# Altium footprint library WR-PHD_Socket Header_2.54mm.PcbLib: 187 footprints (part 8 of 12)
Each footprint in its own frame and in the unit in brackets; x right, y up, seen from the top. Pads: shape width x height; smd on the part's side, far side on the other; paste and mask are expansions set on the pad; w line width, h text height; cw(c..) or ccw(c..) is an arc to the next point about the centre after c.
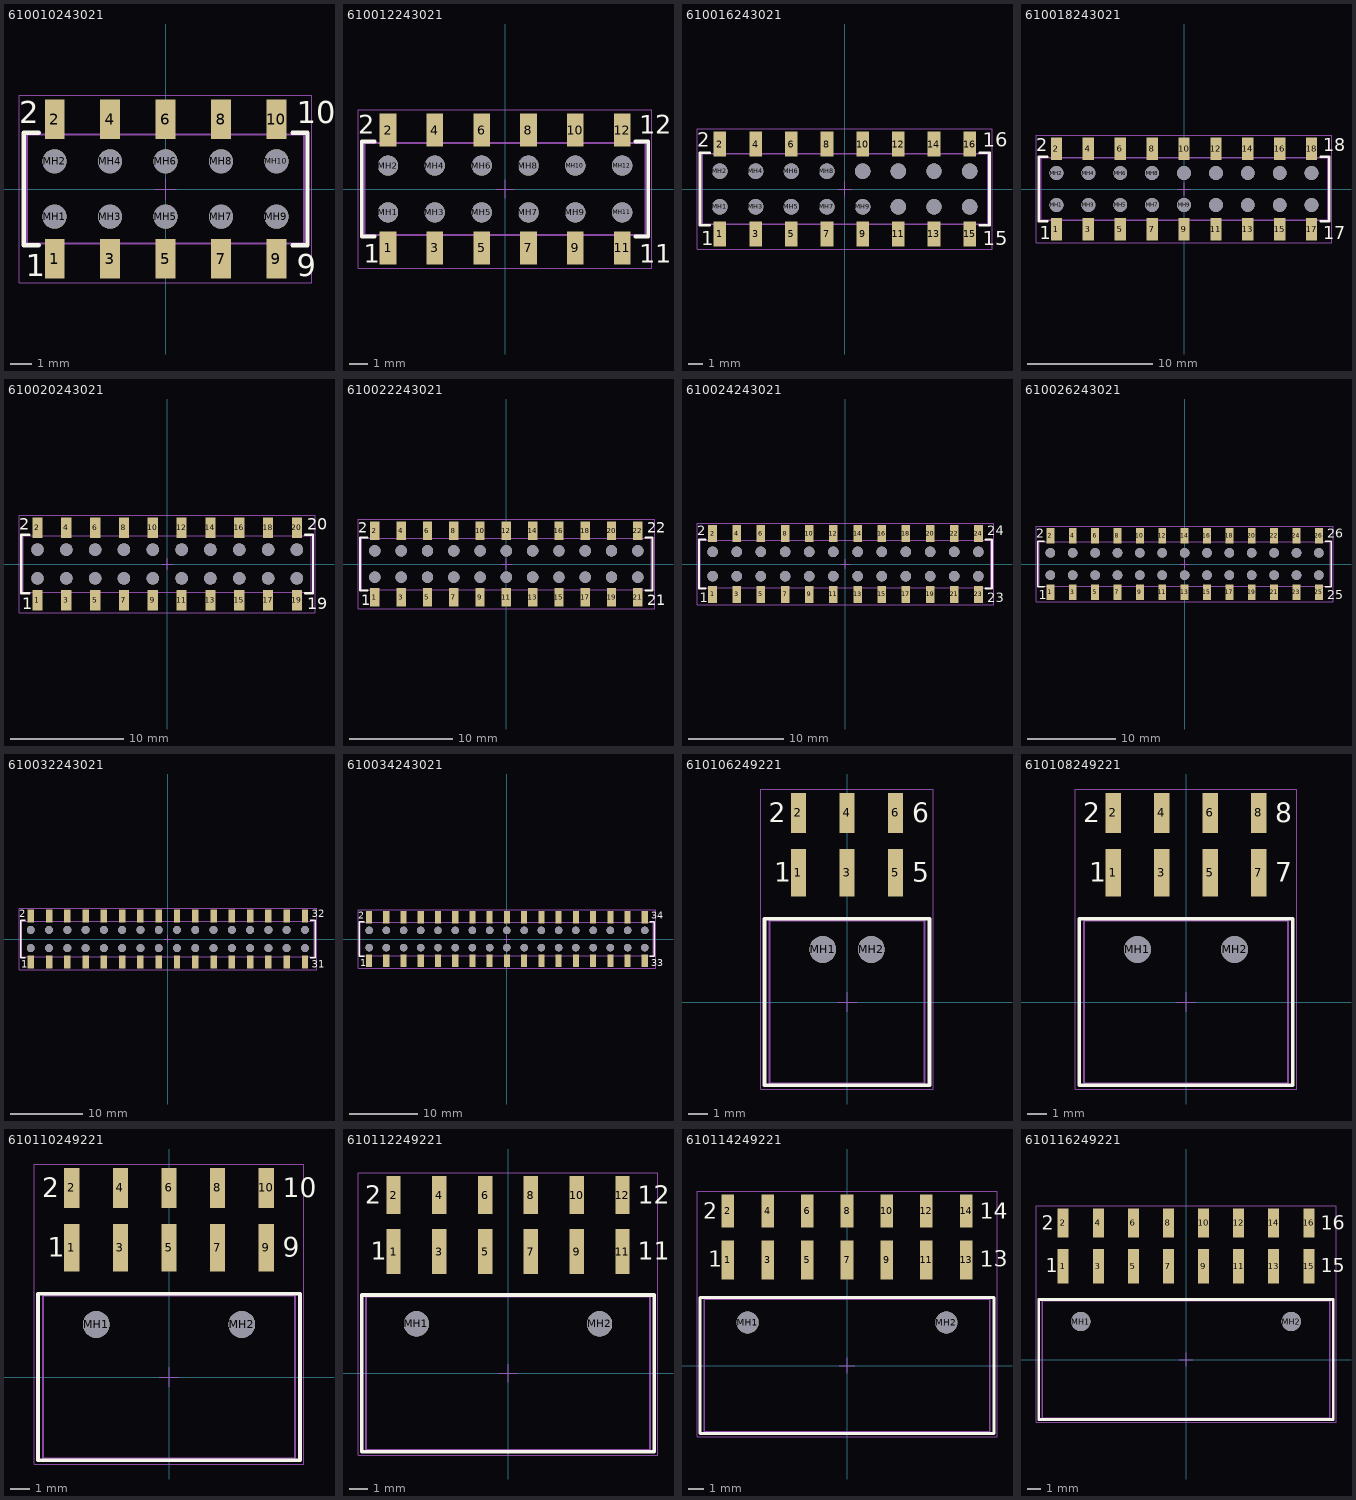
[diagram p7: the footprints below, top view; thin cyan lines are the x and y axes]

## 610010243021 [mm] "Socket Header, Pitch 2.54 mm, SMT, Vertical, dual row, 10p"
height 3.7
pads (20):
  rect 0.9x1.8 smd: 1(-5.08,-3.2) 2(-5.08,3.2) 3(-2.54,-3.2) 4(-2.54,3.2) 5(0,-3.2) 6(0,3.2) 7(2.54,-3.2) 8(2.54,3.2) 9(5.08,-3.2) 10(5.08,3.2)
  round 1.1 hole 1.1 unplated: MH1(-5.08,-1.27) MH2(-5.08,1.27) MH3(-2.54,-1.27) MH4(-2.54,1.27) MH5(0,-1.27) MH6(0,1.27) MH7(2.54,-1.27) MH8(2.54,1.27) MH9(5.08,-1.27) MH10(5.08,1.27)
Top Overlay:
  lines w0.2: -5.81,-2.575 -6.5,-2.575 -6.5,2.575 -5.81,2.575 ; 5.81,-2.575 6.5,-2.575 6.5,2.575 5.81,2.575
  text "1" at -6.41,-4 h1.02
  text "2" at -6.71,3 h1.02
  text "10" at 6.01,3 h1.02
  text "9" at 6.01,-4 h1.02
Mechanical 13:
  lines w0.1: -5.33,-2.5 -5.33,-3.6 -4.83,-3.6 -4.83,-2.5 ; -5.33,2.5 -5.33,3.6 -4.83,3.6 -4.83,2.5 ; -2.79,-2.5 -2.79,-3.6 -2.29,-3.6 -2.29,-2.5 ; -2.79,2.5 -2.79,3.6 -2.29,3.6 -2.29,2.5 ; -0.25,-2.5 -0.25,-3.6 0.25,-3.6 0.25,-2.5 ; -0.25,2.5 -0.25,3.6 0.25,3.6 0.25,2.5 ; 2.29,-2.5 2.29,-3.6 2.79,-3.6 2.79,-2.5 ; 2.29,2.5 2.29,3.6 2.79,3.6 2.79,2.5 ; 4.83,-2.5 4.83,-3.6 5.33,-3.6 5.33,-2.5 ; 4.83,2.5 4.83,3.6 5.33,3.6 5.33,2.5 ; -6.35,-2.5 6.35,-2.5 6.35,2.5 -6.35,2.5 -6.35,-2.5
Mechanical 15:
  lines w0.05: -0.5,0 0.5,0 ; 0,-0.5 0,0.5 ; -6.7,-4.3 6.7,-4.3 6.7,4.3 -6.7,4.3 -6.7,-4.3
3D body "610010243021.stp": height 3.7, standoff 0, extent -6.35,-3.603 6.35,3.603

## 610012243021 [mm] "Socket Header, Pitch 2.54 mm, SMT, Vertical, dual row, 12p"
height 3.7
pads (24):
  rect 0.9x1.8 smd: 1(-6.35,-3.2) 2(-6.35,3.2) 3(-3.81,-3.2) 4(-3.81,3.2) 5(-1.27,-3.2) 6(-1.27,3.2) 7(1.27,-3.2) 8(1.27,3.2) 9(3.81,-3.2) 10(3.81,3.2) 11(6.35,-3.2) 12(6.35,3.2)
  round 1.1 hole 1.1 unplated: MH1(-6.35,-1.27) MH2(-6.35,1.27) MH3(-3.81,-1.27) MH4(-3.81,1.27) MH5(-1.27,-1.27) MH6(-1.27,1.27) MH7(1.27,-1.27) MH8(1.27,1.27) MH9(3.81,-1.27) MH10(3.81,1.27) MH11(6.35,-1.27) MH12(6.35,1.27)
Top Overlay:
  lines w0.2: -7.08,-2.575 -7.77,-2.575 -7.77,2.575 -7.08,2.575 ; 7.08,-2.575 7.77,-2.575 7.77,2.575 7.08,2.575
  text "2" at -7.98,3 h1.02
  text "1" at -7.68,-4 h1.02
  text "12" at 7.28,3 h1.02
  text "11" at 7.28,-4 h1.02
Mechanical 13:
  lines w0.1: -6.6,-2.5 -6.6,-3.6 -6.1,-3.6 -6.1,-2.5 ; -6.6,2.5 -6.6,3.6 -6.1,3.6 -6.1,2.5 ; -4.06,-2.5 -4.06,-3.6 -3.56,-3.6 -3.56,-2.5 ; -4.06,2.5 -4.06,3.6 -3.56,3.6 -3.56,2.5 ; -1.52,-2.5 -1.52,-3.6 -1.02,-3.6 -1.02,-2.5 ; -1.52,2.5 -1.52,3.6 -1.02,3.6 -1.02,2.5 ; 1.02,-2.5 1.02,-3.6 1.52,-3.6 1.52,-2.5 ; 1.02,2.5 1.02,3.6 1.52,3.6 1.52,2.5 ; 3.56,-2.5 3.56,-3.6 4.06,-3.6 4.06,-2.5 ; 3.56,2.5 3.56,3.6 4.06,3.6 4.06,2.5 ; 6.1,-2.5 6.1,-3.6 6.6,-3.6 6.6,-2.5 ; 6.1,2.5 6.1,3.6 6.6,3.6 6.6,2.5 ; -7.62,-2.5 -7.62,2.5 7.62,2.5 7.62,-2.5 -7.62,-2.5
Mechanical 15:
  lines w0.05: -0.5,0 0.5,0 ; 0,-0.5 0,0.5 ; -7.97,-4.3 -7.97,4.3 7.97,4.3 7.97,-4.3 -7.97,-4.3
3D body "610012243021.stp": height 3.7, standoff 0, extent -7.62,-3.603 7.62,3.603

## 610016243021 [mm] "Socket Header, Pitch 2.54 mm, SMT, Vertical, dual row, 16p"
height 3.7
pads (32):
  rect 0.9x1.8 smd: 1(-8.89,-3.2) 2(-8.89,3.2) 3(-6.35,-3.2) 4(-6.35,3.2) 5(-3.81,-3.2) 6(-3.81,3.2) 7(-1.27,-3.2) 8(-1.27,3.2) 9(1.27,-3.2) 10(1.27,3.2) 11(3.81,-3.2) 12(3.81,3.2) 13(6.35,-3.2) 14(6.35,3.2) 15(8.89,-3.2) 16(8.89,3.2)
  round 1.1 hole 1.1 unplated: MH1(-8.89,-1.27) MH2(-8.89,1.27) MH3(-6.35,-1.27) MH4(-6.35,1.27) MH5(-3.81,-1.27) MH6(-3.81,1.27) MH7(-1.27,-1.27) MH8(-1.27,1.27) MH9(1.27,-1.27) MH10(1.27,1.27) MH11(3.81,-1.27) MH12(3.81,1.27) MH13(6.35,-1.27) MH14(6.35,1.27) MH15(8.89,-1.27) MH16(8.89,1.27)
Top Overlay:
  lines w0.2: -9.62,-2.575 -10.31,-2.575 -10.31,2.575 -9.62,2.575 ; 9.62,-2.575 10.31,-2.575 10.31,2.575 9.62,2.575
  text "1" at -10.22,-4 h1.02
  text "2" at -10.52,3 h1.02
  text "16" at 9.82,3 h1.02
  text "15" at 9.82,-4 h1.02
Mechanical 13:
  lines w0.1: -9.14,-2.5 -9.14,-3.6 -8.64,-3.6 -8.64,-2.5 ; -9.14,2.5 -9.14,3.6 -8.64,3.6 -8.64,2.5 ; -6.6,-2.5 -6.6,-3.6 -6.1,-3.6 -6.1,-2.5 ; -6.6,2.5 -6.6,3.6 -6.1,3.6 -6.1,2.5 ; -4.06,-2.5 -4.06,-3.6 -3.56,-3.6 -3.56,-2.5 ; -4.06,2.5 -4.06,3.6 -3.56,3.6 -3.56,2.5 ; -1.52,-2.5 -1.52,-3.6 -1.02,-3.6 -1.02,-2.5 ; -1.52,2.5 -1.52,3.6 -1.02,3.6 -1.02,2.5 ; 1.02,-2.5 1.02,-3.6 1.52,-3.6 1.52,-2.5 ; 1.02,2.5 1.02,3.6 1.52,3.6 1.52,2.5 ; 3.56,-2.5 3.56,-3.6 4.06,-3.6 4.06,-2.5 ; 3.56,2.5 3.56,3.6 4.06,3.6 4.06,2.5 ; 6.1,-2.5 6.1,-3.6 6.6,-3.6 6.6,-2.5 ; 6.1,2.5 6.1,3.6 6.6,3.6 6.6,2.5 ; 8.64,-2.5 8.64,-3.6 9.14,-3.6 9.14,-2.5 ; 8.64,2.5 8.64,3.6 9.14,3.6 9.14,2.5 ; -10.16,-2.5 10.16,-2.5 10.16,2.5 -10.16,2.5 -10.16,-2.5
Mechanical 15:
  lines w0.05: -0.5,0 0.5,0 ; 0,-0.5 0,0.5 ; -10.51,-4.3 10.51,-4.3 10.51,4.3 -10.51,4.3 -10.51,-4.3
3D body "610016243021.stp": height 3.7, standoff 0, extent -10.16,-3.603 10.16,3.603

## 610018243021 [mm] "Socket Header, Pitch 2.54 mm, SMT, Vertical, dual row, 18p"
height 3.7
pads (36):
  rect 0.9x1.8 smd: 1(-10.16,-3.2) 2(-10.16,3.2) 3(-7.62,-3.2) 4(-7.62,3.2) 5(-5.08,-3.2) 6(-5.08,3.2) 7(-2.54,-3.2) 8(-2.54,3.2) 9(0,-3.2) 10(0,3.2) 11(2.54,-3.2) 12(2.54,3.2) 13(5.08,-3.2) 14(5.08,3.2) 15(7.62,-3.2) 16(7.62,3.2) 17(10.16,-3.2) 18(10.16,3.2)
  round 1.1 hole 1.1 unplated: MH1(-10.16,-1.27) MH2(-10.16,1.27) MH3(-7.62,-1.27) MH4(-7.62,1.27) MH5(-5.08,-1.27) MH6(-5.08,1.27) MH7(-2.54,-1.27) MH8(-2.54,1.27) MH9(0,-1.27) MH10(0,1.27) MH11(2.54,-1.27) MH12(2.54,1.27) MH13(5.08,-1.27) MH14(5.08,1.27) MH15(7.62,-1.27) MH16(7.62,1.27) MH17(10.16,-1.27) MH18(10.16,1.27)
Top Overlay:
  lines w0.2: -10.89,-2.575 -11.58,-2.575 -11.58,2.575 -10.89,2.575 ; 10.89,-2.575 11.58,-2.575 11.58,2.575 10.89,2.575
  text "2" at -11.79,3 h1.02
  text "1" at -11.49,-4 h1.02
  text "18" at 11.09,3 h1.02
  text "17" at 11.09,-4 h1.02
Mechanical 13:
  lines w0.1: -10.41,-2.5 -10.41,-3.6 -9.91,-3.6 -9.91,-2.5 ; -10.41,2.5 -10.41,3.6 -9.91,3.6 -9.91,2.5 ; -7.87,-2.5 -7.87,-3.6 -7.37,-3.6 -7.37,-2.5 ; -7.87,2.5 -7.87,3.6 -7.37,3.6 -7.37,2.5 ; -5.33,-2.5 -5.33,-3.6 -4.83,-3.6 -4.83,-2.5 ; -5.33,2.5 -5.33,3.6 -4.83,3.6 -4.83,2.5 ; -2.79,-2.5 -2.79,-3.6 -2.29,-3.6 -2.29,-2.5 ; -2.79,2.5 -2.79,3.6 -2.29,3.6 -2.29,2.5 ; -0.25,-2.5 -0.25,-3.6 0.25,-3.6 0.25,-2.5 ; -0.25,2.5 -0.25,3.6 0.25,3.6 0.25,2.5 ; 2.29,-2.5 2.29,-3.6 2.79,-3.6 2.79,-2.5 ; 2.29,2.5 2.29,3.6 2.79,3.6 2.79,2.5 ; 4.83,-2.5 4.83,-3.6 5.33,-3.6 5.33,-2.5 ; 4.83,2.5 4.83,3.6 5.33,3.6 5.33,2.5 ; 7.37,-2.5 7.37,-3.6 7.87,-3.6 7.87,-2.5 ; 7.37,2.5 7.37,3.6 7.87,3.6 7.87,2.5 ; 9.91,-2.5 9.91,-3.6 10.41,-3.6 10.41,-2.5 ; 9.91,2.5 9.91,3.6 10.41,3.6 10.41,2.5 ; -11.43,-2.5 -11.43,2.5 11.43,2.5 11.43,-2.5 -11.43,-2.5
Mechanical 15:
  lines w0.05: -0.5,0 0.5,0 ; 0,-0.5 0,0.5 ; -11.78,-4.3 -11.78,4.3 11.78,4.3 11.78,-4.3 -11.78,-4.3
3D body "610018243021.stp": height 3.7, standoff 0, extent -11.43,-3.603 11.43,3.603

## 610020243021 [mm] "Socket Header, Pitch 2.54 mm, SMT, Vertical, dual row, 20p"
height 3.7
pads (40):
  rect 0.9x1.8 smd: 1(-11.43,-3.2) 2(-11.43,3.2) 3(-8.89,-3.2) 4(-8.89,3.2) 5(-6.35,-3.2) 6(-6.35,3.2) 7(-3.81,-3.2) 8(-3.81,3.2) 9(-1.27,-3.2) 10(-1.27,3.2) 11(1.27,-3.2) 12(1.27,3.2) 13(3.81,-3.2) 14(3.81,3.2) 15(6.35,-3.2) 16(6.35,3.2) 17(8.89,-3.2) 18(8.89,3.2) 19(11.43,-3.2) 20(11.43,3.2)
  round 1.1 hole 1.1 unplated: MH1(-11.43,-1.27) MH2(-11.43,1.27) MH3(-8.89,-1.27) MH4(-8.89,1.27) MH5(-6.35,-1.27) MH6(-6.35,1.27) MH7(-3.81,-1.27) MH8(-3.81,1.27) MH9(-1.27,-1.27) MH10(-1.27,1.27) MH11(1.27,-1.27) MH12(1.27,1.27) MH13(3.81,-1.27) MH14(3.81,1.27) MH15(6.35,-1.27) MH16(6.35,1.27) MH17(8.89,-1.27) MH18(8.89,1.27) MH19(11.43,-1.27) MH20(11.43,1.27)
Top Overlay:
  lines w0.2: -12.16,-2.575 -12.85,-2.575 -12.85,2.575 -12.16,2.575 ; 12.16,-2.575 12.85,-2.575 12.85,2.575 12.16,2.575
  text "19" at 12.36,-4 h1.02
  text "20" at 12.36,3 h1.02
  text "2" at -13.06,3 h1.02
  text "1" at -12.76,-4 h1.02
Mechanical 13:
  lines w0.1: -11.68,-2.5 -11.68,-3.6 -11.18,-3.6 -11.18,-2.5 ; -11.68,2.5 -11.68,3.6 -11.18,3.6 -11.18,2.5 ; -9.14,-2.5 -9.14,-3.6 -8.64,-3.6 -8.64,-2.5 ; -9.14,2.5 -9.14,3.6 -8.64,3.6 -8.64,2.5 ; -6.6,-2.5 -6.6,-3.6 -6.1,-3.6 -6.1,-2.5 ; -6.6,2.5 -6.6,3.6 -6.1,3.6 -6.1,2.5 ; -4.06,-2.5 -4.06,-3.6 -3.56,-3.6 -3.56,-2.5 ; -4.06,2.5 -4.06,3.6 -3.56,3.6 -3.56,2.5 ; -1.52,-2.5 -1.52,-3.6 -1.02,-3.6 -1.02,-2.5 ; -1.52,2.5 -1.52,3.6 -1.02,3.6 -1.02,2.5 ; 1.02,-2.5 1.02,-3.6 1.52,-3.6 1.52,-2.5 ; 1.02,2.5 1.02,3.6 1.52,3.6 1.52,2.5 ; 3.56,-2.5 3.56,-3.6 4.06,-3.6 4.06,-2.5 ; 3.56,2.5 3.56,3.6 4.06,3.6 4.06,2.5 ; 6.1,-2.5 6.1,-3.6 6.6,-3.6 6.6,-2.5 ; 6.1,2.5 6.1,3.6 6.6,3.6 6.6,2.5 ; 8.64,-2.5 8.64,-3.6 9.14,-3.6 9.14,-2.5 ; 8.64,2.5 8.64,3.6 9.14,3.6 9.14,2.5 ; 11.18,-2.5 11.18,-3.6 11.68,-3.6 11.68,-2.5 ; 11.18,2.5 11.18,3.6 11.68,3.6 11.68,2.5 ; -12.7,-2.5 -12.7,2.5 12.7,2.5 12.7,-2.5 -12.7,-2.5
Mechanical 15:
  lines w0.05: -0.5,0 0.5,0 ; 0,-0.5 0,0.5 ; -13.05,-4.3 -13.05,4.3 13.05,4.3 13.05,-4.3 -13.05,-4.3
3D body "610020243021.stp": height 3.7, standoff 0, extent -12.7,-3.603 12.7,3.603

## 610022243021 [mm] "Socket Header, Pitch 2.54 mm, SMT, Vertical, dual row, 22p"
height 3.7
pads (44):
  rect 0.9x1.8 smd: 1(-12.7,-3.2) 2(-12.7,3.2) 3(-10.16,-3.2) 4(-10.16,3.2) 5(-7.62,-3.2) 6(-7.62,3.2) 7(-5.08,-3.2) 8(-5.08,3.2) 9(-2.54,-3.2) 10(-2.54,3.2) 11(0,-3.2) 12(0,3.2) 13(2.54,-3.2) 14(2.54,3.2) 15(5.08,-3.2) 16(5.08,3.2) 17(7.62,-3.2) 18(7.62,3.2) 19(10.16,-3.2) 20(10.16,3.2) 21(12.7,-3.2) 22(12.7,3.2)
  round 1.1 hole 1.1 unplated: MH1(-12.7,-1.27) MH2(-12.7,1.27) MH3(-10.16,-1.27) MH4(-10.16,1.27) MH5(-7.62,-1.27) MH6(-7.62,1.27) MH7(-5.08,-1.27) MH8(-5.08,1.27) MH9(-2.54,-1.27) MH10(-2.54,1.27) MH11(0,-1.27) MH12(0,1.27) MH13(2.54,-1.27) MH14(2.54,1.27) MH15(5.08,-1.27) MH16(5.08,1.27) MH17(7.62,-1.27) MH18(7.62,1.27) MH19(10.16,-1.27) MH20(10.16,1.27) MH21(12.7,-1.27) MH22(12.7,1.27)
Top Overlay:
  lines w0.2: -13.43,-2.575 -14.12,-2.575 -14.12,2.575 -13.43,2.575 ; 13.43,-2.575 14.12,-2.575 14.12,2.575 13.43,2.575
  text "21" at 13.63,-4 h1.02
  text "22" at 13.63,3 h1.02
  text "1" at -14.03,-4 h1.02
  text "2" at -14.33,3 h1.02
Mechanical 13:
  lines w0.1: -12.95,-2.5 -12.95,-3.6 -12.45,-3.6 -12.45,-2.5 ; -12.95,2.5 -12.95,3.6 -12.45,3.6 -12.45,2.5 ; -10.41,-2.5 -10.41,-3.6 -9.91,-3.6 -9.91,-2.5 ; -10.41,2.5 -10.41,3.6 -9.91,3.6 -9.91,2.5 ; -7.87,-2.5 -7.87,-3.6 -7.37,-3.6 -7.37,-2.5 ; -7.87,2.5 -7.87,3.6 -7.37,3.6 -7.37,2.5 ; -5.33,-2.5 -5.33,-3.6 -4.83,-3.6 -4.83,-2.5 ; -5.33,2.5 -5.33,3.6 -4.83,3.6 -4.83,2.5 ; -2.79,-2.5 -2.79,-3.6 -2.29,-3.6 -2.29,-2.5 ; -2.79,2.5 -2.79,3.6 -2.29,3.6 -2.29,2.5 ; -0.25,-2.5 -0.25,-3.6 0.25,-3.6 0.25,-2.5 ; -0.25,2.5 -0.25,3.6 0.25,3.6 0.25,2.5 ; 2.29,-2.5 2.29,-3.6 2.79,-3.6 2.79,-2.5 ; 2.29,2.5 2.29,3.6 2.79,3.6 2.79,2.5 ; 4.83,-2.5 4.83,-3.6 5.33,-3.6 5.33,-2.5 ; 4.83,2.5 4.83,3.6 5.33,3.6 5.33,2.5 ; 7.37,-2.5 7.37,-3.6 7.87,-3.6 7.87,-2.5 ; 7.37,2.5 7.37,3.6 7.87,3.6 7.87,2.5 ; 9.91,-2.5 9.91,-3.6 10.41,-3.6 10.41,-2.5 ; 9.91,2.5 9.91,3.6 10.41,3.6 10.41,2.5 ; 12.45,-2.5 12.45,-3.6 12.95,-3.6 12.95,-2.5 ; 12.45,2.5 12.45,3.6 12.95,3.6 12.95,2.5 ; -13.97,-2.5 13.97,-2.5 13.97,2.5 -13.97,2.5 -13.97,-2.5
Mechanical 15:
  lines w0.05: -0.5,0 0.5,0 ; 0,-0.5 0,0.5 ; -14.32,-4.3 14.32,-4.3 14.32,4.3 -14.32,4.3 -14.32,-4.3
3D body "610022243021.stp": height 3.7, standoff 0, extent -13.97,-3.603 13.97,3.603

## 610024243021 [mm] "Socket Header, Pitch 2.54 mm, SMT, Vertical, dual row, 24p"
height 3.7
pads (48):
  rect 0.9x1.8 smd: 1(-13.97,-3.2) 2(-13.97,3.2) 3(-11.43,-3.2) 4(-11.43,3.2) 5(-8.89,-3.2) 6(-8.89,3.2) 7(-6.35,-3.2) 8(-6.35,3.2) 9(-3.81,-3.2) 10(-3.81,3.2) 11(-1.27,-3.2) 12(-1.27,3.2) 13(1.27,-3.2) 14(1.27,3.2) 15(3.81,-3.2) 16(3.81,3.2) 17(6.35,-3.2) 18(6.35,3.2) 19(8.89,-3.2) 20(8.89,3.2) 21(11.43,-3.2) 22(11.43,3.2) 23(13.97,-3.2) 24(13.97,3.2)
  round 1.1 hole 1.1 unplated: MH1(-13.97,-1.27) MH2(-13.97,1.27) MH3(-11.43,-1.27) MH4(-11.43,1.27) MH5(-8.89,-1.27) MH6(-8.89,1.27) MH7(-6.35,-1.27) MH8(-6.35,1.27) MH9(-3.81,-1.27) MH10(-3.81,1.27) MH11(-1.27,-1.27) MH12(-1.27,1.27) MH13(1.27,-1.27) MH14(1.27,1.27) MH15(3.81,-1.27) MH16(3.81,1.27) MH17(6.35,-1.27) MH18(6.35,1.27) MH19(8.89,-1.27) MH20(8.89,1.27) MH21(11.43,-1.27) MH22(11.43,1.27) MH23(13.97,-1.27) MH24(13.97,1.27)
Top Overlay:
  lines w0.2: -14.7,-2.575 -15.39,-2.575 -15.39,2.575 -14.7,2.575 ; 14.7,-2.575 15.39,-2.575 15.39,2.575 14.7,2.575
  text "1" at -15.3,-4 h1.02
  text "2" at -15.6,3 h1.02
  text "24" at 14.9,3 h1.02
  text "23" at 14.9,-4 h1.02
Mechanical 13:
  lines w0.1: -14.22,-2.5 -14.22,-3.6 -13.72,-3.6 -13.72,-2.5 ; -14.22,2.5 -14.22,3.6 -13.72,3.6 -13.72,2.5 ; -11.68,-2.5 -11.68,-3.6 -11.18,-3.6 -11.18,-2.5 ; -11.68,2.5 -11.68,3.6 -11.18,3.6 -11.18,2.5 ; -9.14,-2.5 -9.14,-3.6 -8.64,-3.6 -8.64,-2.5 ; -9.14,2.5 -9.14,3.6 -8.64,3.6 -8.64,2.5 ; -6.6,-2.5 -6.6,-3.6 -6.1,-3.6 -6.1,-2.5 ; -6.6,2.5 -6.6,3.6 -6.1,3.6 -6.1,2.5 ; -4.06,-2.5 -4.06,-3.6 -3.56,-3.6 -3.56,-2.5 ; -4.06,2.5 -4.06,3.6 -3.56,3.6 -3.56,2.5 ; -1.52,-2.5 -1.52,-3.6 -1.02,-3.6 -1.02,-2.5 ; -1.52,2.5 -1.52,3.6 -1.02,3.6 -1.02,2.5 ; 1.02,-2.5 1.02,-3.6 1.52,-3.6 1.52,-2.5 ; 1.02,2.5 1.02,3.6 1.52,3.6 1.52,2.5 ; 3.56,-2.5 3.56,-3.6 4.06,-3.6 4.06,-2.5 ; 3.56,2.5 3.56,3.6 4.06,3.6 4.06,2.5 ; 6.1,-2.5 6.1,-3.6 6.6,-3.6 6.6,-2.5 ; 6.1,2.5 6.1,3.6 6.6,3.6 6.6,2.5 ; 8.64,-2.5 8.64,-3.6 9.14,-3.6 9.14,-2.5 ; 8.64,2.5 8.64,3.6 9.14,3.6 9.14,2.5 ; 11.18,-2.5 11.18,-3.6 11.68,-3.6 11.68,-2.5 ; 11.18,2.5 11.18,3.6 11.68,3.6 11.68,2.5 ; 13.72,-2.5 13.72,-3.6 14.22,-3.6 14.22,-2.5 ; 13.72,2.5 13.72,3.6 14.22,3.6 14.22,2.5 ; -15.24,-2.5 15.24,-2.5 15.24,2.5 -15.24,2.5 -15.24,-2.5
Mechanical 15:
  lines w0.05: -0.5,0 0.5,0 ; 0,-0.5 0,0.5 ; -15.59,-4.3 15.59,-4.3 15.59,4.3 -15.59,4.3 -15.59,-4.3
3D body "610024243021.stp": height 3.7, standoff 0, extent -15.24,-3.603 15.24,3.603

## 610026243021 [mm] "Socket Header, Pitch 2.54 mm, SMT, Vertical, dual row, 26p"
height 3.7
pads (52):
  rect 0.9x1.8 smd: 1(-15.24,-3.2) 2(-15.24,3.2) 3(-12.7,-3.2) 4(-12.7,3.2) 5(-10.16,-3.2) 6(-10.16,3.2) 7(-7.62,-3.2) 8(-7.62,3.2) 9(-5.08,-3.2) 10(-5.08,3.2) 11(-2.54,-3.2) 12(-2.54,3.2) 13(0,-3.2) 14(0,3.2) 15(2.54,-3.2) 16(2.54,3.2) 17(5.08,-3.2) 18(5.08,3.2) 19(7.62,-3.2) 20(7.62,3.2) 21(10.16,-3.2) 22(10.16,3.2) 23(12.7,-3.2) 24(12.7,3.2) 25(15.24,-3.2) 26(15.24,3.2)
  round 1.1 hole 1.1 unplated: MH1(-15.24,-1.27) MH2(-15.24,1.27) MH3(-12.7,-1.27) MH4(-12.7,1.27) MH5(-10.16,-1.27) MH6(-10.16,1.27) MH7(-7.62,-1.27) MH8(-7.62,1.27) MH9(-5.08,-1.27) MH10(-5.08,1.27) MH11(-2.54,-1.27) MH12(-2.54,1.27) MH13(0,-1.27) MH14(0,1.27) MH15(2.54,-1.27) MH16(2.54,1.27) MH17(5.08,-1.27) MH18(5.08,1.27) MH19(7.62,-1.27) MH20(7.62,1.27) MH21(10.16,-1.27) MH22(10.16,1.27) MH23(12.7,-1.27) MH24(12.7,1.27) MH25(15.24,-1.27) MH26(15.24,1.27)
Top Overlay:
  lines w0.2: -15.97,-2.575 -16.66,-2.575 -16.66,2.575 -15.97,2.575 ; 15.97,-2.575 16.66,-2.575 16.66,2.575 15.97,2.575
  text "2" at -16.87,3 h1.02
  text "1" at -16.57,-4 h1.02
  text "26" at 16.17,3 h1.02
  text "25" at 16.17,-4 h1.02
Mechanical 13:
  lines w0.1: -15.49,-2.5 -15.49,-3.6 -14.99,-3.6 -14.99,-2.5 ; -15.49,2.5 -15.49,3.6 -14.99,3.6 -14.99,2.5 ; -12.95,-2.5 -12.95,-3.6 -12.45,-3.6 -12.45,-2.5 ; -12.95,2.5 -12.95,3.6 -12.45,3.6 -12.45,2.5 ; -10.41,-2.5 -10.41,-3.6 -9.91,-3.6 -9.91,-2.5 ; -10.41,2.5 -10.41,3.6 -9.91,3.6 -9.91,2.5 ; -7.87,-2.5 -7.87,-3.6 -7.37,-3.6 -7.37,-2.5 ; -7.87,2.5 -7.87,3.6 -7.37,3.6 -7.37,2.5 ; -5.33,-2.5 -5.33,-3.6 -4.83,-3.6 -4.83,-2.5 ; -5.33,2.5 -5.33,3.6 -4.83,3.6 -4.83,2.5 ; -2.79,-2.5 -2.79,-3.6 -2.29,-3.6 -2.29,-2.5 ; -2.79,2.5 -2.79,3.6 -2.29,3.6 -2.29,2.5 ; -0.25,-2.5 -0.25,-3.6 0.25,-3.6 0.25,-2.5 ; -0.25,2.5 -0.25,3.6 0.25,3.6 0.25,2.5 ; 2.29,-2.5 2.29,-3.6 2.79,-3.6 2.79,-2.5 ; 2.29,2.5 2.29,3.6 2.79,3.6 2.79,2.5 ; 4.83,-2.5 4.83,-3.6 5.33,-3.6 5.33,-2.5 ; 4.83,2.5 4.83,3.6 5.33,3.6 5.33,2.5 ; 7.37,-2.5 7.37,-3.6 7.87,-3.6 7.87,-2.5 ; 7.37,2.5 7.37,3.6 7.87,3.6 7.87,2.5 ; 9.91,-2.5 9.91,-3.6 10.41,-3.6 10.41,-2.5 ; 9.91,2.5 9.91,3.6 10.41,3.6 10.41,2.5 ; 12.45,-2.5 12.45,-3.6 12.95,-3.6 12.95,-2.5 ; 12.45,2.5 12.45,3.6 12.95,3.6 12.95,2.5 ; 14.99,-2.5 14.99,-3.6 15.49,-3.6 15.49,-2.5 ; 14.99,2.5 14.99,3.6 15.49,3.6 15.49,2.5 ; -16.51,-2.5 -16.51,2.5 16.51,2.5 16.51,-2.5 -16.51,-2.5
Mechanical 15:
  lines w0.05: -0.5,0 0.5,0 ; 0,-0.5 0,0.5 ; -16.86,-4.3 -16.86,4.3 16.86,4.3 16.86,-4.3 -16.86,-4.3
3D body "610026243021.stp": height 3.7, standoff 0, extent -16.51,-3.603 16.51,3.603

## 610032243021 [mm] "Socket Header, Pitch 2.54 mm, SMT, Vertical, dual row, 32p"
height 3.7
pads (64):
  rect 0.9x1.8 smd: 1(-19.05,-3.2) 2(-19.05,3.2) 3(-16.51,-3.2) 4(-16.51,3.2) 5(-13.97,-3.2) 6(-13.97,3.2) 7(-11.43,-3.2) 8(-11.43,3.2) 9(-8.89,-3.2) 10(-8.89,3.2) 11(-6.35,-3.2) 12(-6.35,3.2) 13(-3.81,-3.2) 14(-3.81,3.2) 15(-1.27,-3.2) 16(-1.27,3.2) 17(1.27,-3.2) 18(1.27,3.2) 19(3.81,-3.2) 20(3.81,3.2) 21(6.35,-3.2) 22(6.35,3.2) 23(8.89,-3.2) 24(8.89,3.2) 25(11.43,-3.2) 26(11.43,3.2) 27(13.97,-3.2) 28(13.97,3.2) 29(16.51,-3.2) 30(16.51,3.2) 31(19.05,-3.2) 32(19.05,3.2)
  round 1.1 hole 1.1 unplated: MH1(-19.05,-1.27) MH2(-19.05,1.27) MH3(-16.51,-1.27) MH4(-16.51,1.27) MH5(-13.97,-1.27) MH6(-13.97,1.27) MH7(-11.43,-1.27) MH8(-11.43,1.27) MH9(-8.89,-1.27) MH10(-8.89,1.27) MH11(-6.35,-1.27) MH12(-6.35,1.27) MH13(-3.81,-1.27) MH14(-3.81,1.27) MH15(-1.27,-1.27) MH16(-1.27,1.27) MH17(1.27,-1.27) MH18(1.27,1.27) MH19(3.81,-1.27) MH20(3.81,1.27) MH21(6.35,-1.27) MH22(6.35,1.27) MH23(8.89,-1.27) MH24(8.89,1.27) MH25(11.43,-1.27) MH26(11.43,1.27) MH27(13.97,-1.27) MH28(13.97,1.27) MH29(16.51,-1.27) MH30(16.51,1.27) MH31(19.05,-1.27) MH32(19.05,1.27)
Top Overlay:
  lines w0.2: -19.78,-2.575 -20.47,-2.575 -20.47,2.575 -19.78,2.575 ; 19.78,-2.575 20.47,-2.575 20.47,2.575 19.78,2.575
  text "31" at 19.98,-4 h1.02
  text "32" at 19.98,3 h1.02
  text "2" at -20.68,3 h1.02
  text "1" at -20.38,-4 h1.02
Mechanical 13:
  lines w0.1: -19.3,-2.5 -19.3,-3.6 -18.8,-3.6 -18.8,-2.5 ; -19.3,2.5 -19.3,3.6 -18.8,3.6 -18.8,2.5 ; -16.76,-2.5 -16.76,-3.6 -16.26,-3.6 -16.26,-2.5 ; -16.76,2.5 -16.76,3.6 -16.26,3.6 -16.26,2.5 ; -14.22,-2.5 -14.22,-3.6 -13.72,-3.6 -13.72,-2.5 ; -14.22,2.5 -14.22,3.6 -13.72,3.6 -13.72,2.5 ; -11.68,-2.5 -11.68,-3.6 -11.18,-3.6 -11.18,-2.5 ; -11.68,2.5 -11.68,3.6 -11.18,3.6 -11.18,2.5 ; -9.14,-2.5 -9.14,-3.6 -8.64,-3.6 -8.64,-2.5 ; -9.14,2.5 -9.14,3.6 -8.64,3.6 -8.64,2.5 ; -6.6,-2.5 -6.6,-3.6 -6.1,-3.6 -6.1,-2.5 ; -6.6,2.5 -6.6,3.6 -6.1,3.6 -6.1,2.5 ; -4.06,-2.5 -4.06,-3.6 -3.56,-3.6 -3.56,-2.5 ; -4.06,2.5 -4.06,3.6 -3.56,3.6 -3.56,2.5 ; -1.52,-2.5 -1.52,-3.6 -1.02,-3.6 -1.02,-2.5 ; -1.52,2.5 -1.52,3.6 -1.02,3.6 -1.02,2.5 ; 1.02,-2.5 1.02,-3.6 1.52,-3.6 1.52,-2.5 ; 1.02,2.5 1.02,3.6 1.52,3.6 1.52,2.5 ; 3.56,-2.5 3.56,-3.6 4.06,-3.6 4.06,-2.5 ; 3.56,2.5 3.56,3.6 4.06,3.6 4.06,2.5 ; 6.1,-2.5 6.1,-3.6 6.6,-3.6 6.6,-2.5 ; 6.1,2.5 6.1,3.6 6.6,3.6 6.6,2.5 ; 8.64,-2.5 8.64,-3.6 9.14,-3.6 9.14,-2.5 ; 8.64,2.5 8.64,3.6 9.14,3.6 9.14,2.5 ; 11.18,-2.5 11.18,-3.6 11.68,-3.6 11.68,-2.5 ; 11.18,2.5 11.18,3.6 11.68,3.6 11.68,2.5 ; 13.72,-2.5 13.72,-3.6 14.22,-3.6 14.22,-2.5 ; 13.72,2.5 13.72,3.6 14.22,3.6 14.22,2.5 ; 16.26,-2.5 16.26,-3.6 16.76,-3.6 16.76,-2.5 ; 16.26,2.5 16.26,3.6 16.76,3.6 16.76,2.5 ; 18.8,-2.5 18.8,-3.6 19.3,-3.6 19.3,-2.5 ; 18.8,2.5 18.8,3.6 19.3,3.6 19.3,2.5 ; -20.32,-2.5 -20.32,2.5 20.32,2.5 20.32,-2.5 -20.32,-2.5
Mechanical 15:
  lines w0.05: -0.5,0 0.5,0 ; 0,-0.5 0,0.5 ; -20.67,-4.3 -20.67,4.3 20.67,4.3 20.67,-4.3 -20.67,-4.3
3D body "610032243021.stp": height 3.7, standoff 0, extent -20.32,-3.603 20.32,3.603

## 610034243021 [mm] "Socket Header, Pitch 2.54 mm, SMT, Vertical, dual row, 34p"
height 3.7
pads (68):
  rect 0.9x1.8 smd: 1(-20.32,-3.2) 2(-20.32,3.2) 3(-17.78,-3.2) 4(-17.78,3.2) 5(-15.24,-3.2) 6(-15.24,3.2) 7(-12.7,-3.2) 8(-12.7,3.2) 9(-10.16,-3.2) 10(-10.16,3.2) 11(-7.62,-3.2) 12(-7.62,3.2) 13(-5.08,-3.2) 14(-5.08,3.2) 15(-2.54,-3.2) 16(-2.54,3.2) 17(0,-3.2) 18(0,3.2) 19(2.54,-3.2) 20(2.54,3.2) 21(5.08,-3.2) 22(5.08,3.2) 23(7.62,-3.2) 24(7.62,3.2) 25(10.16,-3.2) 26(10.16,3.2) 27(12.7,-3.2) 28(12.7,3.2) 29(15.24,-3.2) 30(15.24,3.2) 31(17.78,-3.2) 32(17.78,3.2) 33(20.32,-3.2) 34(20.32,3.2)
  round 1.1 hole 1.1 unplated: MH1(-20.32,-1.27) MH2(-20.32,1.27) MH3(-17.78,-1.27) MH4(-17.78,1.27) MH5(-15.24,-1.27) MH6(-15.24,1.27) MH7(-12.7,-1.27) MH8(-12.7,1.27) MH9(-10.16,-1.27) MH10(-10.16,1.27) MH11(-7.62,-1.27) MH12(-7.62,1.27) MH13(-5.08,-1.27) MH14(-5.08,1.27) MH15(-2.54,-1.27) MH16(-2.54,1.27) MH17(0,-1.27) MH18(0,1.27) MH19(2.54,-1.27) MH20(2.54,1.27) MH21(5.08,-1.27) MH22(5.08,1.27) MH23(7.62,-1.27) MH24(7.62,1.27) MH25(10.16,-1.27) MH26(10.16,1.27) MH27(12.7,-1.27) MH28(12.7,1.27) MH29(15.24,-1.27) MH30(15.24,1.27) MH31(17.78,-1.27) MH32(17.78,1.27) MH33(20.32,-1.27) MH34(20.32,1.27)
Top Overlay:
  lines w0.2: -21.05,-2.575 -21.74,-2.575 -21.74,2.575 -21.05,2.575 ; 21.05,-2.575 21.74,-2.575 21.74,2.575 21.05,2.575
  text "33" at 21.25,-4 h1.02
  text "34" at 21.25,3 h1.02
  text "2" at -21.95,3 h1.02
  text "1" at -21.65,-4 h1.02
Mechanical 13:
  lines w0.1: -20.57,-2.5 -20.57,-3.6 -20.07,-3.6 -20.07,-2.5 ; -20.57,2.5 -20.57,3.6 -20.07,3.6 -20.07,2.5 ; -18.03,-2.5 -18.03,-3.6 -17.53,-3.6 -17.53,-2.5 ; -18.03,2.5 -18.03,3.6 -17.53,3.6 -17.53,2.5 ; -15.49,-2.5 -15.49,-3.6 -14.99,-3.6 -14.99,-2.5 ; -15.49,2.5 -15.49,3.6 -14.99,3.6 -14.99,2.5 ; -12.95,-2.5 -12.95,-3.6 -12.45,-3.6 -12.45,-2.5 ; -12.95,2.5 -12.95,3.6 -12.45,3.6 -12.45,2.5 ; -10.41,-2.5 -10.41,-3.6 -9.91,-3.6 -9.91,-2.5 ; -10.41,2.5 -10.41,3.6 -9.91,3.6 -9.91,2.5 ; -7.87,-2.5 -7.87,-3.6 -7.37,-3.6 -7.37,-2.5 ; -7.87,2.5 -7.87,3.6 -7.37,3.6 -7.37,2.5 ; -5.33,-2.5 -5.33,-3.6 -4.83,-3.6 -4.83,-2.5 ; -5.33,2.5 -5.33,3.6 -4.83,3.6 -4.83,2.5 ; -2.79,-2.5 -2.79,-3.6 -2.29,-3.6 -2.29,-2.5 ; -2.79,2.5 -2.79,3.6 -2.29,3.6 -2.29,2.5 ; -0.25,-2.5 -0.25,-3.6 0.25,-3.6 0.25,-2.5 ; -0.25,2.5 -0.25,3.6 0.25,3.6 0.25,2.5 ; 2.29,-2.5 2.29,-3.6 2.79,-3.6 2.79,-2.5 ; 2.29,2.5 2.29,3.6 2.79,3.6 2.79,2.5 ; 4.83,-2.5 4.83,-3.6 5.33,-3.6 5.33,-2.5 ; 4.83,2.5 4.83,3.6 5.33,3.6 5.33,2.5 ; 7.37,-2.5 7.37,-3.6 7.87,-3.6 7.87,-2.5 ; 7.37,2.5 7.37,3.6 7.87,3.6 7.87,2.5 ; 9.91,-2.5 9.91,-3.6 10.41,-3.6 10.41,-2.5 ; 9.91,2.5 9.91,3.6 10.41,3.6 10.41,2.5 ; 12.45,-2.5 12.45,-3.6 12.95,-3.6 12.95,-2.5 ; 12.45,2.5 12.45,3.6 12.95,3.6 12.95,2.5 ; 14.99,-2.5 14.99,-3.6 15.49,-3.6 15.49,-2.5 ; 14.99,2.5 14.99,3.6 15.49,3.6 15.49,2.5 ; 17.53,-2.5 17.53,-3.6 18.03,-3.6 18.03,-2.5 ; 17.53,2.5 17.53,3.6 18.03,3.6 18.03,2.5 ; 20.07,-2.5 20.07,-3.6 20.57,-3.6 20.57,-2.5 ; 20.07,2.5 20.07,3.6 20.57,3.6 20.57,2.5 ; -21.59,-2.5 -21.59,2.5 21.59,2.5 21.59,-2.5 -21.59,-2.5
Mechanical 15:
  lines w0.05: -0.5,0 0.5,0 ; 0,-0.5 0,0.5 ; -21.94,-4.3 -21.94,4.3 21.94,4.3 21.94,-4.3 -21.94,-4.3
3D body "610034243021.stp": height 3.7, standoff 0, extent -21.59,-3.603 21.59,3.603

## 610106249221 [mm] "Socket Header, Pitch 2.54 mm, SMT, Angled, dual row, 6p"
height 5.2
pads (8):
  rect 0.8x2.5 smd: 1(-2.54,6.76) 3(0,6.76) 5(2.54,6.76)
  rect 0.8x2.1 smd: 2(-2.54,9.89) 4(0,9.89) 6(2.54,9.89)
  round 1.4 hole 1.4 unplated: MH1(-1.27,2.75) MH2(1.27,2.75)
Top Overlay:
  lines w0.2: -4.31,-4.35 4.31,-4.35 4.31,4.35 -4.31,4.35 -4.31,-4.35
  text "1" at -3.8,6.3 h1.02
  text "2" at -4.1,9.4 h1.02
  text "5" at 3.4,6.3 h1.02
  text "6" at 3.4,9.4 h1.02
Mechanical 13:
  lines w0.1: -4.06,-4.25 -4.06,4.25 4.06,4.25 4.06,-4.25 -4.06,-4.25
Mechanical 15:
  lines w0.05: -0.5,0 0.5,0 ; 0,-0.5 0,0.5 ; -4.51,-4.55 -4.51,11.14 4.51,11.14 4.51,-4.55 -4.51,-4.55
3D body "610106249221.stp": height 5.03, standoff -1.27, extent -4.06,-4.25 4.06,10.44

## 610108249221 [mm] "Socket Header, Pitch 2.54 mm, SMT, Angled, dual row, 8p"
height 5.2
pads (10):
  rect 0.8x2.5 smd: 1(-3.81,6.76) 3(-1.27,6.76) 5(1.27,6.76) 7(3.81,6.76)
  rect 0.8x2.1 smd: 2(-3.81,9.89) 4(-1.27,9.89) 6(1.27,9.89) 8(3.81,9.89)
  round 1.4 hole 1.4 unplated: MH1(-2.54,2.75) MH2(2.54,2.75)
Top Overlay:
  lines w0.2: -5.58,-4.35 5.58,-4.35 5.58,4.35 -5.58,4.35 -5.58,-4.35
  text "1" at -5.07,6.3 h1.02
  text "2" at -5.37,9.4 h1.02
  text "7" at 4.67,6.3 h1.02
  text "8" at 4.67,9.4 h1.02
Mechanical 13:
  lines w0.1: -5.33,-4.25 -5.33,4.25 5.33,4.25 5.33,-4.25 -5.33,-4.25
Mechanical 15:
  lines w0.05: -0.5,0 0.5,0 ; 0,-0.5 0,0.5 ; -5.78,-4.55 -5.78,11.14 5.78,11.14 5.78,-4.55 -5.78,-4.55
3D body "610108249221.stp": height 5.03, standoff -1.27, extent -5.33,-4.25 5.33,10.44

## 610110249221 [mm] "Socket Header, Pitch 2.54 mm, SMT, Angled, dual row, 10p"
height 5.2
pads (12):
  rect 0.8x2.5 smd: 1(-5.08,6.76) 3(-2.54,6.76) 5(0,6.76) 7(2.54,6.76) 9(5.08,6.76)
  rect 0.8x2.1 smd: 2(-5.08,9.89) 4(-2.54,9.89) 6(0,9.89) 8(2.54,9.89) 10(5.08,9.89)
  round 1.4 hole 1.4 unplated: MH1(-3.81,2.75) MH2(3.81,2.75)
Top Overlay:
  lines w0.2: -6.85,-4.35 -6.85,4.35 6.85,4.35 6.85,-4.35 -6.85,-4.35
  text "2" at -6.64,9.4 h1.02
  text "1" at -6.34,6.3 h1.02
  text "9" at 5.94,6.3 h1.02
  text "10" at 5.94,9.4 h1.02
Mechanical 13:
  lines w0.1: -6.6,-4.25 6.6,-4.25 6.6,4.25 -6.6,4.25 -6.6,-4.25
Mechanical 15:
  lines w0.05: -0.5,0 0.5,0 ; 0,-0.5 0,0.5 ; -7.05,-4.55 7.05,-4.55 7.05,11.14 -7.05,11.14 -7.05,-4.55
3D body "610110249221.stp": height 5.03, standoff -1.27, extent -6.6,-4.25 6.6,10.44

## 610112249221 [mm] "Socket Header, Pitch 2.54 mm, SMT, Angled, dual row, 12p"
height 5.2
pads (14):
  rect 0.8x2.5 smd: 1(-6.35,6.76) 3(-3.81,6.76) 5(-1.27,6.76) 7(1.27,6.76) 9(3.81,6.76) 11(6.35,6.76)
  rect 0.8x2.1 smd: 2(-6.35,9.89) 4(-3.81,9.89) 6(-1.27,9.89) 8(1.27,9.89) 10(3.81,9.89) 12(6.35,9.89)
  round 1.4 hole 1.4 unplated: MH1(-5.08,2.75) MH2(5.08,2.75)
Top Overlay:
  lines w0.2: -8.12,-4.35 8.12,-4.35 8.12,4.35 -8.12,4.35 -8.12,-4.35
  text "1" at -7.61,6.3 h1.02
  text "2" at -7.91,9.4 h1.02
  text "12" at 7.21,9.4 h1.02
  text "11" at 7.21,6.3 h1.02
Mechanical 13:
  lines w0.1: -7.87,-4.25 -7.87,4.25 7.87,4.25 7.87,-4.25 -7.87,-4.25
Mechanical 15:
  lines w0.05: -0.5,0 0.5,0 ; 0,-0.5 0,0.5 ; -8.32,-4.55 -8.32,11.14 8.32,11.14 8.32,-4.55 -8.32,-4.55
3D body "610112249221.stp": height 5.03, standoff -1.27, extent -7.87,-4.25 7.87,10.44

## 610114249221 [mm] "Socket Header, Pitch 2.54 mm, SMT, Angled, dual row, 14p"
height 5.2
pads (16):
  rect 0.8x2.5 smd: 1(-7.62,6.76) 3(-5.08,6.76) 5(-2.54,6.76) 7(0,6.76) 9(2.54,6.76) 11(5.08,6.76) 13(7.62,6.76)
  rect 0.8x2.1 smd: 2(-7.62,9.89) 4(-5.08,9.89) 6(-2.54,9.89) 8(0,9.89) 10(2.54,9.89) 12(5.08,9.89) 14(7.62,9.89)
  round 1.4 hole 1.4 unplated: MH1(-6.35,2.75) MH2(6.35,2.75)
Top Overlay:
  lines w0.2: -9.39,-4.35 -9.39,4.35 9.39,4.35 9.39,-4.35 -9.39,-4.35
  text "2" at -9.18,9.4 h1.02
  text "1" at -8.88,6.3 h1.02
  text "13" at 8.48,6.3 h1.02
  text "14" at 8.48,9.4 h1.02
Mechanical 13:
  lines w0.1: -9.14,-4.25 9.14,-4.25 9.14,4.25 -9.14,4.25 -9.14,-4.25
Mechanical 15:
  lines w0.05: -0.5,0 0.5,0 ; 0,-0.5 0,0.5 ; -9.59,-4.55 9.59,-4.55 9.59,11.14 -9.59,11.14 -9.59,-4.55
3D body "610114249221.stp": height 5.03, standoff -1.27, extent -9.14,-4.25 9.14,10.44

## 610116249221 [mm] "Socket Header, Pitch 2.54 mm, SMT, Angled, dual row, 16p"
height 5.2
pads (18):
  rect 0.8x2.5 smd: 1(-8.89,6.76) 3(-6.35,6.76) 5(-3.81,6.76) 7(-1.27,6.76) 9(1.27,6.76) 11(3.81,6.76) 13(6.35,6.76) 15(8.89,6.76)
  rect 0.8x2.1 smd: 2(-8.89,9.89) 4(-6.35,9.89) 6(-3.81,9.89) 8(-1.27,9.89) 10(1.27,9.89) 12(3.81,9.89) 14(6.35,9.89) 16(8.89,9.89)
  round 1.4 hole 1.4 unplated: MH1(-7.62,2.75) MH2(7.62,2.75)
Top Overlay:
  lines w0.2: -10.66,-4.35 10.66,-4.35 10.66,4.35 -10.66,4.35 -10.66,-4.35
  text "15" at 9.75,6.3 h1.02
  text "16" at 9.75,9.4 h1.02
  text "1" at -10.15,6.3 h1.02
  text "2" at -10.45,9.4 h1.02
Mechanical 13:
  lines w0.1: -10.41,-4.25 -10.41,4.25 10.41,4.25 10.41,-4.25 -10.41,-4.25
Mechanical 15:
  lines w0.05: -0.5,0 0.5,0 ; 0,-0.5 0,0.5 ; -10.86,-4.55 -10.86,11.14 10.86,11.14 10.86,-4.55 -10.86,-4.55
3D body "610116249221.stp": height 5.03, standoff -1.27, extent -10.41,-4.25 10.41,10.44